# Altium footprint library BeadFilter$.PcbLib: 13 footprints
Each footprint in its own frame and in the unit in brackets; x right, y up, seen from the top. Pads: shape width x height; smd on the part's side, far side on the other; paste and mask are expansions set on the pad; w line width, h text height; cw(c..) or ccw(c..) is an arc to the next point about the centre after c.
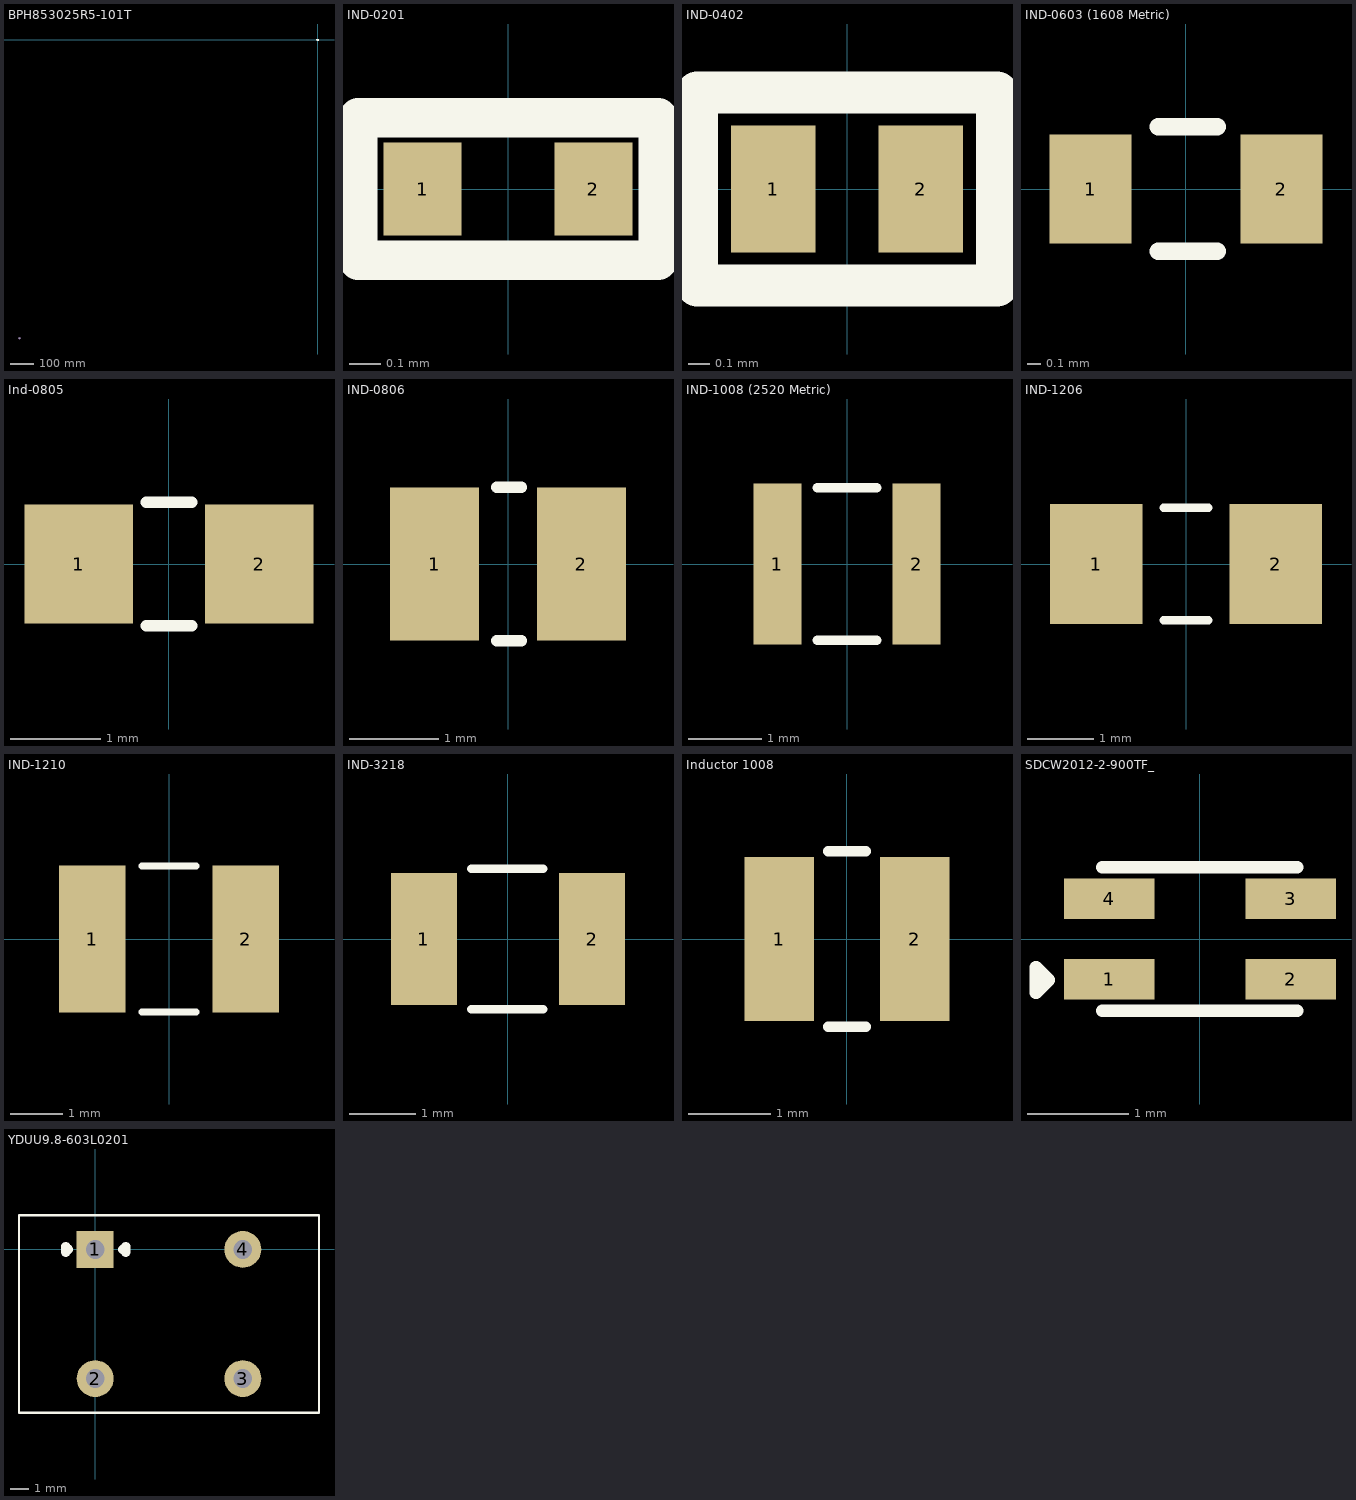
[diagram p0: the footprints below, top view; thin cyan lines are the x and y axes]

## BPH853025R5-101T [mm]
pads (31):
  round 0.16 on Mech27 hole 0.16: 1(-1269.906,-1267.873)
  round 0.153 on Mech43 hole 0.153: 1(-1269.655,-1269.88) 1(-1269.655,-1267.619) 1(-1266.063,-1269.88) 1(-1266.063,-1267.759)
  round 0.021 on Mech27 hole 0.021: 1(-1269.625,-1269.369) 1(-1269.625,-1268.843)
  round 0.021 on Mech43 hole 0.021: 1(-1269.608,-1268.274) 1(-1269.605,-1268.213)
  round 0.052 on Mech51 hole 0.052: 1(-1269.319,-1269.865) 1(-1269.027,-1267.568) 1(-1266.271,-1269.61) 1(-1266.071,-1268.085)
  round 0.033 on Mech43 hole 0.033: 1(-1269.236,-1269.496) 1(-1268.635,-1268.092) 1(-1268.067,-1268.09)
  round 0.114 on Mech43 hole 0.114: 1(-1269.043,-1268.65) 1(-1267.122,-1268.65)
  round 0.012 on Mech27 hole 0.012: 1(-1268.994,-1267.986)
  round 0.02 on Mech27 hole 0.02: 1(-1268.965,-1268.791) 1(-1268.952,-1268.791) 1(-1268.897,-1268.972) 1(-1268.884,-1268.972)
  round 0.019 on Mech27 hole 0.019: 1(-1268.939,-1268.791) 1(-1268.871,-1268.972)
  round 0.014 on Mech43 hole 0.014: 1(-1267.632,-1267.666) 1(-1267.607,-1267.681)
  round 0.295 on Mech43 hole 0.295: 1(-1267.342,-1268.05)
  round 0.013 on Mech43 hole 0.013: 1(-1266.384,-1268.923)
  rect 3.1x1.5 smd: 1(-3.8,0) 2(3.8,0)
Top Overlay:
  lines w0.127: -4.5,-0.944 -4.5,-1.5 4.5,-1.5 4.5,-0.961 ; -4.5,0.961 -4.5,1.482 4.482,1.482 ; 4.5,0.944 4.5,1.5
Mechanical 3:
  lines w0.004: -1269.771,-1269.905 ccw(c-1269.695,-1269.905) -1269.695,-1269.981 -1266.038,-1269.981 ccw(c-1266.038,-1269.905) -1265.961,-1269.905 -1265.961,-1267.478 ccw(c-1266.038,-1267.478) -1266.038,-1267.402 -1269.695,-1267.402 ccw(c-1269.695,-1267.478) -1269.771,-1267.478 -1269.771,-1269.905
Mechanical 27:
  drawing of 1963 lines, arcs and shapes, not listed
Mechanical 43:
  drawing of 735 lines, arcs and shapes, not listed
Mechanical 44:
  drawing of 1544 lines, arcs and shapes, not listed
Mechanical 51:
  lines w0.013: -1269.457,-1268.081 -1269.457,-1267.98 -1269.34,-1267.98 -1269.34,-1268.081 -1269.457,-1268.081 ; -1268.971,-1268.823 -1268.932,-1268.823 -1268.932,-1268.759 -1268.971,-1268.759 -1268.971,-1268.823 ; -1268.903,-1269.004 -1268.865,-1269.004 -1268.865,-1268.939 -1268.903,-1268.939 -1268.903,-1269.004 ; -1268.865,-1268.043 -1268.865,-1267.927 -1268.723,-1267.927 -1268.723,-1268.043 -1268.865,-1268.043 ; -1268.248,-1269.488 -1268.248,-1269.437 -1268.126,-1269.437 -1268.126,-1269.488 -1268.248,-1269.488 ; -1268.248,-1269.345 -1268.248,-1269.295 -1268.126,-1269.295 -1268.126,-1269.345 -1268.248,-1269.345 ; -1268.086,-1269.487 -1268.086,-1269.436 -1267.964,-1269.436 -1267.964,-1269.487 -1268.086,-1269.487 ; -1268.086,-1269.345 -1268.086,-1269.294 -1267.964,-1269.294 -1267.964,-1269.345 -1268.086,-1269.345
Mechanical 64:
  drawing of 3144 lines, arcs and shapes, not listed
3D body "BPH853025R5-101T.STEP": height 2.8, standoff 0, extent -4.5,-1.524 4.5,1.476

## IND-0201 [mm]
pads (2):
  rect 0.25x0.3 smd mask+0.055: 1(-0.275,0) 2(0.275,0)
Top Overlay:
  lines w0.127: -0.483,-0.229 -0.483,0.229 0.483,0.229 0.483,-0.229 -0.483,-0.229
3D body "742692005.stp": height 0.15, standoff -0.15, extent -0.3,-0.15 0.3,0.15

## IND-0402 [mm]
pads (2):
  rect 0.4x0.6 smd: 1(-0.35,0) 2(0.35,0)
Top Overlay:
  lines w0.2: -0.711,-0.457 -0.305,-0.457 0.711,-0.457 0.711,0.457 -0.305,0.457 -0.711,0.457 -0.711,-0.457
3D body "User Library-d0402h025.step": height 0.25, standoff 0, extent -0.5,-0.25 0.5,0.25

## IND-0603 (1608 Metric) [mm] "0.063\" L x 0.032\" W (1.60mm x 0.80mm)"
pads (2):
  rect 0.6x0.8 smd: 1(-0.7,0) 2(0.7,0)
Top Overlay:
  lines w0.127: -0.203,-0.457 0.229,-0.457 ; -0.203,0.457 0.229,0.457
3D body "742792602.stp": height 0.78, standoff -0.02, extent -0.8,-0.4 0.8,0.4

## Ind-0805 [mm] "Inductor 0805"
pads (2):
  rect 1.2x1.32 smd: 1(-1,0) 2(1,0)
Top Overlay:
  lines w0.127: -0.254,-0.686 0.254,-0.686 ; -0.254,0.686 0.254,0.686
3D body "45637.stp": height 0.47, standoff -0.03, extent -1,-0.625 1,0.625

## IND-0806 [mm]
pads (2):
  rect 1x1.72 smd: 1(-0.825,0) 2(0.825,0)
Top Overlay:
  lines w0.127: -0.127,-0.864 0.152,-0.864 ; -0.127,0.864 0.152,0.864
3D body "1286AS-H-R47M=P2.STEP": height 1.2, standoff 0, extent -1,-0.8 1,0.8

## IND-1008 (2520 Metric) [mm]
pads (2):
  rect 0.65x2.2 smd: 1(-0.95,0) 2(0.95,0)
Top Overlay:
  lines w0.127: -0.406,-1.041 0.406,-1.041 ; -0.406,1.041 0.406,1.041
3D body "VLS252012HBX-100M.STEP": height 1.2, standoff 0, extent -1.25,-1 1.25,1

## IND-1206 [mm]
pads (2):
  rect 1.4x1.82 smd: 1(-1.36,0) 2(1.36,0)
Top Overlay:
  lines w0.127: -0.34,-0.849 0.34,-0.849 ; -0.34,0.849 0.34,0.849
3D body "BLM31PG121SN1L.STEP": height 1.3, standoff 0, extent -1.6,-0.8 1.6,0.8

## IND-1210 [mm]
pads (2):
  rect 1.27x2.81 smd: 1(-1.471,0) 2(1.471,0)
Top Overlay:
  lines w0.127: -0.52,-1.4 0.52,-1.4 ; -0.52,1.4 0.52,1.4
3D body "FBMH3225HM601NT.STEP": height 2.5, standoff 0, extent -1.6,-1.397 1.6,1.403

## IND-3218 [mm]
pads (2):
  rect 1x2 smd: 1(-1.275,0) 2(1.275,0)
Top Overlay:
  lines w0.127: -0.559,-1.067 0.533,-1.067 ; -0.559,1.067 0.533,1.067
3D body "IND_TAIYO_LB3218_TAY.step": height 2.01, standoff 0, extent -1.727,-1.006 1.727,1.006

## Inductor 1008 [mm]
pads (2):
  rect 0.85x2 smd: 1(-0.825,0) 2(0.825,0)
Top Overlay:
  lines w0.127: -0.229,-1.067 0.229,-1.067 ; -0.229,1.067 0.229,1.067
3D body "WPN252012H2R2MTY01.STEP": height 1.31, standoff 0, extent -1.25,-1.067 1.25,1.033

## SDCW2012-2-900TF_ [mm]
pads (4):
  rect 0.9x0.4 smd: 1(-0.9,-0.4) 2(0.9,-0.4) 3(0.9,0.4) 4(-0.9,0.4)
Top Overlay:
  lines w0.127: -0.965,-0.711 0.965,-0.711 ; -0.965,0.711 0.965,0.711 ; -1.626,-0.533 -1.499,-0.406 -1.626,-0.279 -1.626,-0.533
3D body "SDCW2012C-2-900TF.stp": height 1.1, standoff 0, extent -1.26,-0.65 1.26,0.65

## YDUU9.8-603L0201 [mm]
pads (4):
  rect 2x2 hole 1.02: 1(0,0)
  round 2 hole 1.02: 2(0,-7) 3(8,-7) 4(8,0)
Top Overlay:
  lines w0.127: -4.128,-8.859 -4.128,1.859 12.128,1.859 12.128,-8.859 -4.128,-8.859
  lines w0.5: -1.6,-0.152 -1.6,0.152 -1.448,0 -1.6,-0.152 ; 1.499,0 1.651,-0.152 1.651,0.152 1.499,0
3D body "User Library-UF9_8.step": height 15.3, standoff -3, extent -4.076,-8.8 12.081,1.8